# Altium footprint library SOMs.PcbLib: 40 footprints (part 1 of 3)
Each footprint in its own frame and in the unit in brackets; x right, y up, seen from the top. Pads: shape width x height; smd on the part's side, far side on the other; paste and mask are expansions set on the pad; w line width, h text height; cw(c..) or ccw(c..) is an arc to the next point about the centre after c.
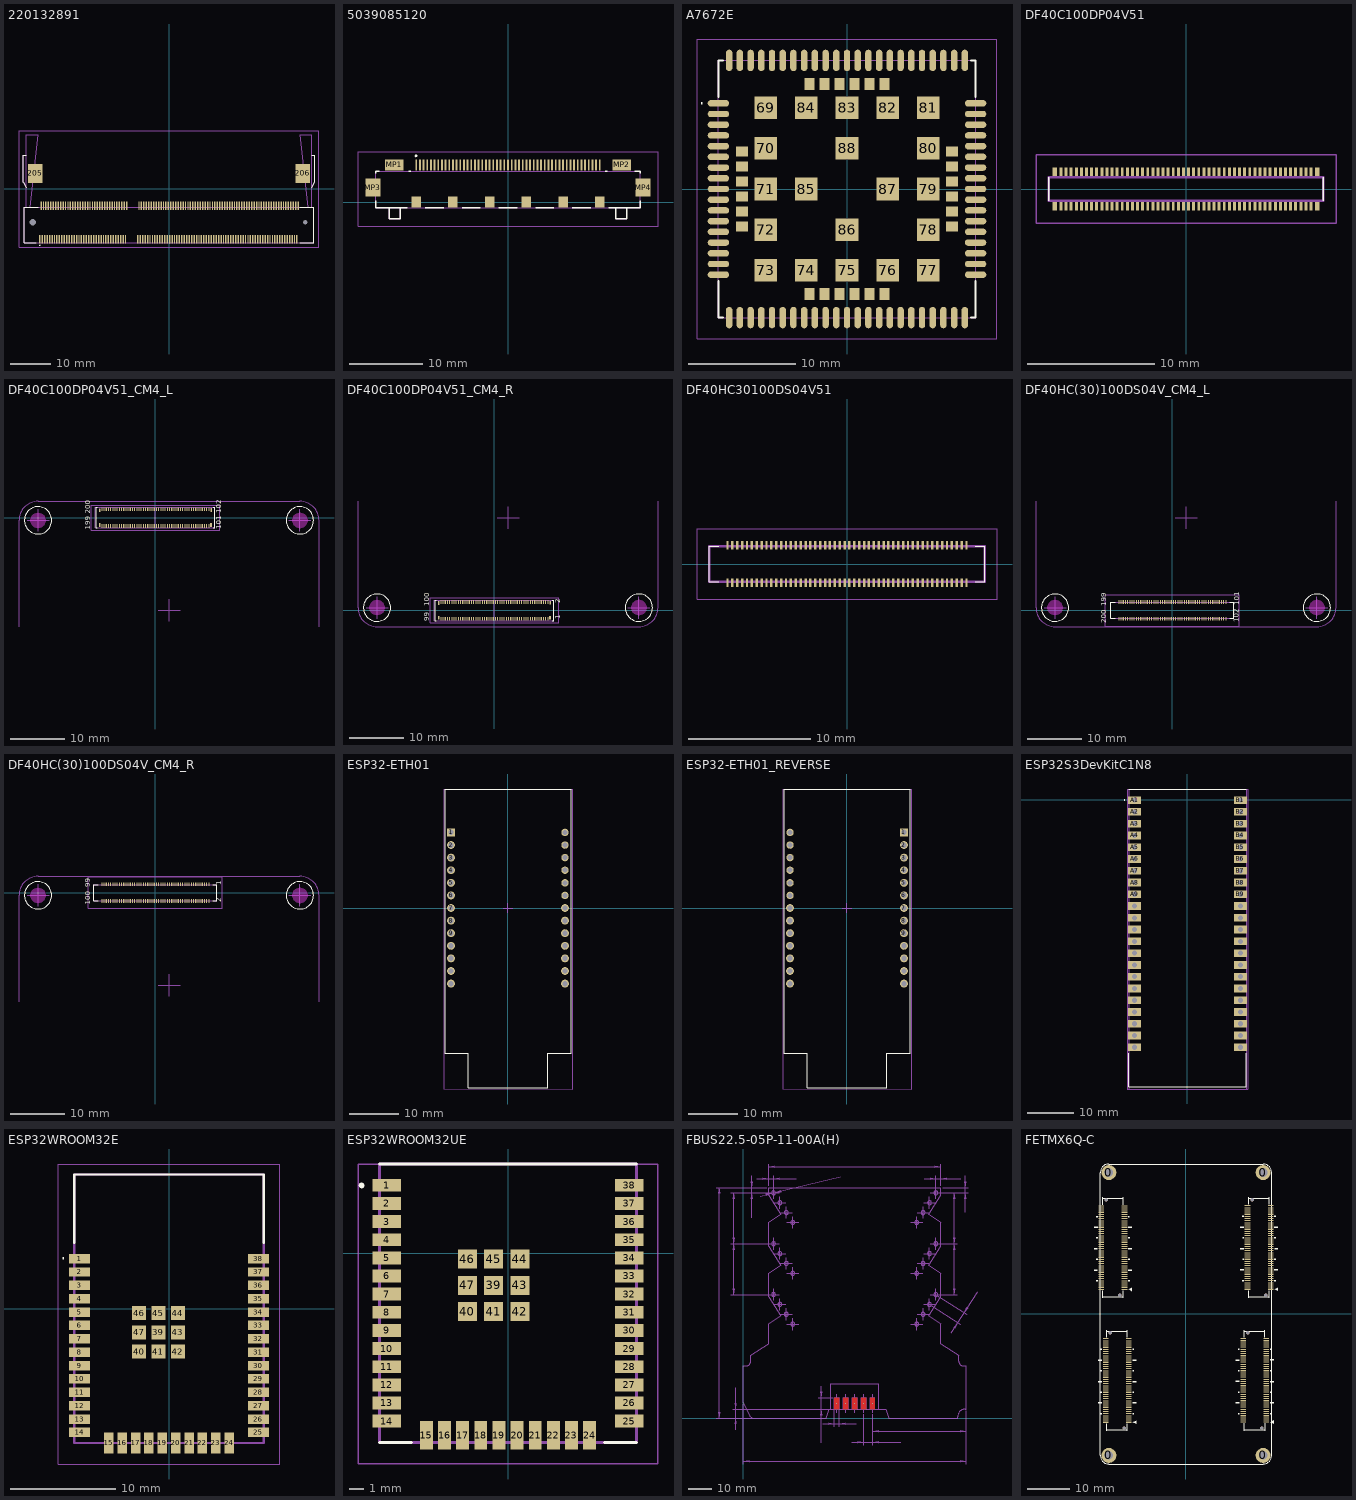
[diagram p0: the footprints below, top view; thin cyan lines are the x and y axes]

## 220132891 [mm]
pads (208):
  rect 0.35x2 smd: 1(-31.65,-12.35) 2(-31.35,-4.15) 3(-31.05,-12.35) 4(-30.75,-4.15) 5(-30.45,-12.35) 6(-30.15,-4.15) 7(-29.85,-12.35) 8(-29.55,-4.15) 9(-29.25,-12.35) 10(-28.95,-4.15) 11(-28.65,-12.35) 12(-28.35,-4.15) 13(-28.05,-12.35) 14(-27.75,-4.15) 15(-27.45,-12.35) 16(-27.15,-4.15) 17(-26.85,-12.35) 18(-26.55,-4.15) 19(-26.25,-12.35) 20(-25.95,-4.15) 21(-25.65,-12.35) 22(-25.35,-4.15) 23(-25.05,-12.35) 24(-24.75,-4.15) 25(-24.45,-12.35) 26(-24.15,-4.15) 27(-23.85,-12.35) 28(-23.55,-4.15) 29(-23.25,-12.35) 30(-22.95,-4.15) 31(-22.65,-12.35) 32(-22.35,-4.15) 33(-22.05,-12.35) 34(-21.75,-4.15) 35(-21.45,-12.35) 36(-21.15,-4.15) 37(-20.85,-12.35) 38(-20.55,-4.15) 39(-20.25,-12.35) 40(-19.95,-4.15) 41(-19.65,-12.35) 42(-19.35,-4.15) 43(-19.05,-12.35) 44(-18.75,-4.15) 45(-18.45,-12.35) 46(-18.15,-4.15) 47(-17.85,-12.35) 48(-17.55,-4.15) 49(-17.25,-12.35) 50(-16.95,-4.15) 51(-16.65,-12.35) 52(-16.35,-4.15) 53(-16.05,-12.35) 54(-15.75,-4.15) 55(-15.45,-12.35) 56(-15.15,-4.15) 57(-14.85,-12.35) 58(-14.55,-4.15) 59(-14.25,-12.35) 60(-13.95,-4.15) 61(-13.65,-12.35) 62(-13.35,-4.15) 63(-13.05,-12.35) 64(-12.75,-4.15) 65(-12.45,-12.35) 66(-12.15,-4.15) 67(-11.85,-12.35) 68(-11.55,-4.15) 69(-11.25,-12.35) 70(-10.95,-4.15) 71(-10.65,-12.35) 72(-10.35,-4.15) 73(-7.65,-12.35) 74(-7.35,-4.15) 75(-7.05,-12.35) 76(-6.75,-4.15) 77(-6.45,-12.35) 78(-6.15,-4.15) 79(-5.85,-12.35) 80(-5.55,-4.15) 81(-5.25,-12.35) 82(-4.95,-4.15) 83(-4.65,-12.35) 84(-4.35,-4.15) 85(-4.05,-12.35) 86(-3.75,-4.15) 87(-3.45,-12.35) 88(-3.15,-4.15) 89(-2.85,-12.35) 90(-2.55,-4.15) 91(-2.25,-12.35) 92(-1.95,-4.15) 93(-1.65,-12.35) 94(-1.35,-4.15) 95(-1.05,-12.35) 96(-0.75,-4.15) 97(-0.45,-12.35) 98(-0.15,-4.15) 99(0.15,-12.35) 100(0.45,-4.15) 101(0.75,-12.35) 102(1.05,-4.15) 103(1.35,-12.35) 104(1.65,-4.15) 105(1.95,-12.35) 106(2.25,-4.15) 107(2.55,-12.35) 108(2.85,-4.15) 109(3.15,-12.35) 110(3.45,-4.15) 111(3.75,-12.35) 112(4.05,-4.15) 113(4.35,-12.35) 114(4.65,-4.15) 115(4.95,-12.35) 116(5.25,-4.15) 117(5.55,-12.35) 118(5.85,-4.15) 119(6.15,-12.35) 120(6.45,-4.15) 121(6.75,-12.35) 122(7.05,-4.15) 123(7.35,-12.35) 124(7.65,-4.15) 125(7.95,-12.35) 126(8.25,-4.15) 127(8.55,-12.35) 128(8.85,-4.15) 129(9.15,-12.35) 130(9.45,-4.15) 131(9.75,-12.35) 132(10.05,-4.15) 133(10.35,-12.35) 134(10.65,-4.15) 135(10.95,-12.35) 136(11.25,-4.15) 137(11.55,-12.35) 138(11.85,-4.15) 139(12.15,-12.35) 140(12.45,-4.15) 141(12.75,-12.35) 142(13.05,-4.15) 143(13.35,-12.35) 144(13.65,-4.15) 145(13.95,-12.35) 146(14.25,-4.15) 147(14.55,-12.35) 148(14.85,-4.15) 149(15.15,-12.35) 150(15.45,-4.15) 151(15.75,-12.35) 152(16.05,-4.15) 153(16.35,-12.35) 154(16.65,-4.15) 155(16.95,-12.35) 156(17.25,-4.15) 157(17.55,-12.35) 158(17.85,-4.15) 159(18.15,-12.35) 160(18.45,-4.15) 161(18.75,-12.35) 162(19.05,-4.15) 163(19.35,-12.35) 164(19.65,-4.15) 165(19.95,-12.35) 166(20.25,-4.15) 167(20.55,-12.35) 168(20.85,-4.15) 169(21.15,-12.35) 170(21.45,-4.15) 171(21.75,-12.35) 172(22.05,-4.15) 173(22.35,-12.35) 174(22.65,-4.15) 175(22.95,-12.35) 176(23.25,-4.15) 177(23.55,-12.35) 178(23.85,-4.15) 179(24.15,-12.35) 180(24.45,-4.15) 181(24.75,-12.35) 182(25.05,-4.15) 183(25.35,-12.35) 184(25.65,-4.15) 185(25.95,-12.35) 186(26.25,-4.15) 187(26.55,-12.35) 188(26.85,-4.15) 189(27.15,-12.35) 190(27.45,-4.15) 191(27.75,-12.35) 192(28.05,-4.15) 193(28.35,-12.35) 194(28.65,-4.15) 195(28.95,-12.35) 196(29.25,-4.15) 197(29.55,-12.35) 198(29.85,-4.15) 199(30.15,-12.35) 200(30.45,-4.15) 201(30.75,-12.35) 202(31.05,-4.15) 203(31.35,-12.35) 204(31.65,-4.15)
  rect 3.5x4.6 smd: 205(-32.8,3.75) 206(32.8,3.75)
  round 0.8 hole 1.6 unplated: 207(-33.4,-8.25)
  round 0.55 hole 1.1 unplated: 208(33.4,-8.25)
Top Overlay:
  lines w0.1: -31.65,-13.9 ccw(c-31.65,-13.85) -31.65,-13.8 ccw(c-31.65,-13.85) -31.65,-13.9
  lines w0.2: -35,0.25 -35.75,1.6 -35.75,8.2 -35,8.2 ; -32.5,-13.25 -35.5,-13.25 -35.5,-4.55 -32,-4.55 ; 32,-13.25 35.5,-13.25 35.5,-4.55 32,-4.55 ; 35,0.2 35.75,1.6 35.75,8.2 35,8.2
Mechanical 13:
  lines w0.1: -35,-4.55 -35,13.25 -32,13.25 -34,-4.55 ; -35,0.2 -35.75,1.6 -35.75,8.2 -35,8.2 ; 34,-4.55 32,13.25 35,13.25 35,-4.55 ; 35,0.2 35.75,1.6 35.75,8.2 35,8.2 ; -35.5,-13.25 -35.5,-4.55 35.5,-4.55 35.5,-13.25 -35.5,-13.25
Mechanical 15:
  lines w0.1: -36.75,-14.35 -36.75,14.25 36.75,14.25 36.75,-14.35 -36.75,-14.35
3D body "2-2013289-1.stp": height 5.51, standoff -0.64, extent -35.8,-13.3 35.8,13.24

## 5039085120 [mm]
pads (61):
  rect 0.25x1.55 smd: 1(-12.5,5.05) 2(-12,5.05) 3(-11.5,5.05) 4(-11,5.05) 5(-10.5,5.05) 6(-10,5.05) 7(-9.5,5.05) 8(-9,5.05) 9(-8.5,5.05) 10(-8,5.05) 11(-7.5,5.05) 12(-7,5.05) 13(-6.5,5.05) 14(-6,5.05) 15(-5.5,5.05) 16(-5,5.05) 17(-4.5,5.05) 18(-4,5.05) 19(-3.5,5.05) 20(-3,5.05) 21(-2.5,5.05) 22(-2,5.05) 23(-1.5,5.05) 24(-1,5.05) 25(-0.5,5.05) 26(0,5.05) 27(0.5,5.05) 28(1,5.05) 29(1.5,5.05) 30(2,5.05) 31(2.5,5.05) 32(3,5.05) 33(3.5,5.05) 34(4,5.05) 35(4.5,5.05) 36(5,5.05) 37(5.5,5.05) 38(6,5.05) 39(6.5,5.05) 40(7,5.05) 41(7.5,5.05) 42(8,5.05) 43(8.5,5.05) 44(9,5.05) 45(9.5,5.05) 46(10,5.05) 47(10.5,5.05) 48(11,5.05) 49(11.5,5.05) 50(12,5.05) 51(12.5,5.05)
  rect 2.5x1.55 smd: MP1(-15.5,5.05) MP2(15.5,5.05)
  rect 2.05x2.5 smd: MP3(-18.4,1.975) MP4(18.4,1.975)
  rect 1.3x1.55 smd: MP5(-12.5,0) MP6(-7.5,0) MP7(-2.5,0) MP8(2.5,0) MP9(7.5,0) MP10(12.5,0)
Top Overlay:
  lines w0.2: -18,-0.77 -16.15,-0.77 ; -18,-0.77 -16.15,-0.77 ; -18,-0.77 -18,0.205 -18,-0.77 ; -18,4.18 -17.5,4.18 -17.5,4.205 -18,4.205 -18,4.18 ; -18,4.18 -18,3.955 -18,4.18 ; -16.15,-0.77 -14.65,-0.77 ; -16.15,-0.77 -16.15,-2.27 -14.65,-2.27 -14.65,-0.77 ; -14.65,-0.77 -13.75,-0.77 -13.75,-0.795 -14.65,-0.795 -14.65,-0.77 ; -12.5,6.2 cw(c-12.5,6.3) -12.5,6.4 ; -12.5,6.2 ccw(c-12.5,6.3) -12.5,6.4 ; -12.5,6.2 cw(c-12.5,6.3) -12.5,6.4 ; 14.65,-0.77 13.75,-0.77 14.65,-0.77 ; 14.65,-0.77 16.15,-0.77 ; 14.65,-0.77 14.65,-2.27 16.15,-2.27 16.15,-0.77 ; 16.15,-0.77 18,-0.77 ; 16.15,-0.77 16.15,-0.795 18,-0.795 18,-0.77 ; 18,-0.77 18,0.205 18,-0.77 ; 18,4.18 17.25,4.18 18,4.18 ; 18,4.18 18,3.955 18,4.18 ; -13.5,4.18 -13.25,4.18 -13.5,4.18 ; -11.25,-0.77 -8.75,-0.77 -11.25,-0.77 ; -6.25,-0.77 -3.75,-0.77 -6.25,-0.77 ; -1.25,-0.77 1.25,-0.77 -1.25,-0.77 ; 3.75,-0.77 6.25,-0.77 3.75,-0.77 ; 8.75,-0.77 11.25,-0.77 8.75,-0.77 ; 13.25,4.18 13.5,4.18 13.5,4.205 13.25,4.205 13.25,4.18
Mechanical 13:
  lines w0.1: -18,-0.77 18,-0.77 18,4.18 -18,4.18 -18,-0.77 ; -16.15,-2.27 -14.65,-2.27 -14.65,-0.77 -16.15,-0.77 -16.15,-2.27 ; 14.65,-2.27 16.15,-2.27 16.15,-0.77 14.65,-0.77 14.65,-2.27
Mechanical 15:
  lines w0.1: -20.425,-3.27 20.425,-3.27 20.425,6.825 -20.425,6.825 -20.425,-3.27
3D body "503908-5120.stp": height 3.75, standoff 0, extent -18.925,-1.9 18.925,5.45

## A7672E [mm]
pads (124):
  rrect100% 2x0.6 smd: 1(-12,8) 2(-12,7) 3(-12,6) 4(-12,5) 5(-12,4) 6(-12,3) 7(-12,2) 8(-12,1) 9(-12,0) 10(-12,-1) 11(-12,-2) 12(-12,-3) 13(-12,-4) 14(-12,-5) 15(-12,-6) 16(-12,-7) 17(-12,-8) 35(12,-8) 36(12,-7) 37(12,-6) 38(12,-5) 39(12,-4) 40(12,-3) 41(12,-2) 42(12,-1) 43(12,0) 44(12,1) 45(12,2) 46(12,3) 47(12,4) 48(12,5) 49(12,6) 50(12,7) 51(12,8)
  rrect100% 0.6x2 smd: 18(-8,-12) 19(-7,-12) 20(-6,-12) 21(-5,-12) 22(-4,-12) 23(-3,-12) 24(-2,-12) 25(-1,-12) 26(0,-12) 27(1,-12) 28(2,-12) 29(3,-12) 30(4,-12) 31(5,-12) 32(6,-12) 33(7,-12) 34(8,-12) 52(8,12) 53(7,12) 54(6,12) 55(5,12) 56(4,12) 57(3,12) 58(2,12) 59(1,12) 60(0,12) 61(-1,12) 62(-2,12) 63(-3,12) 64(-4,12) 65(-5,12) 66(-6,12) 67(-7,12) 68(-8,12) 89(-11,-12) 90(-10,-12) 91(-9,-12) 92(9,-12) 93(10,-12) 94(11,-12) 95(11,12) 96(10,12) 97(9,12) 98(-9,12) 99(-10,12) 100(-11,12)
  rect 2.1x2.1 smd: 69(-7.6,7.6) 70(-7.6,3.8) 71(-7.6,0) 72(-7.6,-3.8) 73(-7.6,-7.6) 74(-3.8,-7.6) 75(0,-7.6) 76(3.8,-7.6) 77(7.6,-7.6) 78(7.6,-3.8) 79(7.6,0) 80(7.6,3.8) 81(7.6,7.6) 82(3.8,7.6) 83(0,7.6) 84(-3.8,7.6) 85(-3.8,0) 86(0,-3.8) 87(3.8,0) 88(0,3.8)
  rect 1.1x0.9 smd: 101(-9.8,3.5) 102(-9.8,2.1) 103(-9.8,0.7) 104(-9.8,-0.7) 105(-9.8,-2.1) 106(-9.8,-3.5) 113(9.8,-3.5) 114(9.8,-2.1) 115(9.8,-0.7) 116(9.8,0.7) 117(9.8,2.1) 118(9.8,3.5)
  rect 0.9x1.1 smd: 107(-3.5,-9.8) 108(-2.1,-9.8) 109(-0.7,-9.8) 110(0.7,-9.8) 111(2.1,-9.8) 112(3.5,-9.8) 119(3.5,9.8) 120(2.1,9.8) 121(0.7,9.8) 122(-0.7,9.8) 123(-2.1,9.8) 124(-3.5,9.8)
Top Overlay:
  lines w0.1: -13.6,8 ccw(c-13.55,8) -13.5,8 ccw(c-13.55,8) -13.6,8
  lines w0.2: -12,-8.6 -12,-12 -11.6,-12 ; -12,8.6 -12,12 -11.6,12 ; 11.6,-12 12,-12 12,-8.6 ; 11.6,12 12,12 12,8.6
Mechanical 13:
  lines w0.1: -12,-12 12,-12 12,12 -12,12 -12,-12
Mechanical 15:
  lines w0.1: -14,-14 14,-14 14,14 -14,14 -14,-14
3D body "A7672E.stp": height 2.7, standoff 0, extent -12,-12 12,12

## DF40C100DP04V51 [mm]
pads (104):
  rect 0.23x0.66 smd: 1(-9.8,-1.355) 2(-9.8,1.355) 3(-9.4,-1.355) 4(-9.4,1.355) 5(-9,-1.355) 6(-9,1.355) 7(-8.6,-1.355) 8(-8.6,1.355) 9(-8.2,-1.355) 10(-8.2,1.355) 11(-7.8,-1.355) 12(-7.8,1.355) 13(-7.4,-1.355) 14(-7.4,1.355) 15(-7,-1.355) 16(-7,1.355) 17(-6.6,-1.355) 18(-6.6,1.355) 19(-6.2,-1.355) 20(-6.2,1.355) 21(-5.8,-1.355) 22(-5.8,1.355) 23(-5.4,-1.355) 24(-5.4,1.355) 25(-5,-1.355) 26(-5,1.355) 27(-4.6,-1.355) 28(-4.6,1.355) 29(-4.2,-1.355) 30(-4.2,1.355) 31(-3.8,-1.355) 32(-3.8,1.355) 33(-3.4,-1.355) 34(-3.4,1.355) 35(-3,-1.355) 36(-3,1.355) 37(-2.6,-1.355) 38(-2.6,1.355) 39(-2.2,-1.355) 40(-2.2,1.355) 41(-1.8,-1.355) 42(-1.8,1.355) 43(-1.4,-1.355) 44(-1.4,1.355) 45(-1,-1.355) 46(-1,1.355) 47(-0.6,-1.355) 48(-0.6,1.355) 49(-0.2,-1.355) 50(-0.2,1.355) 51(0.2,-1.355) 52(0.2,1.355) 53(0.6,-1.355) 54(0.6,1.355) 55(1,-1.355) 56(1,1.355) 57(1.4,-1.355) 58(1.4,1.355) 59(1.8,-1.355) 60(1.8,1.355) 61(2.2,-1.355) 62(2.2,1.355) 63(2.6,-1.355) 64(2.6,1.355) 65(3,-1.355) 66(3,1.355) 67(3.4,-1.355) 68(3.4,1.355) 69(3.8,-1.355) 70(3.8,1.355) 71(4.2,-1.355) 72(4.2,1.355) 73(4.6,-1.355) 74(4.6,1.355) 75(5,-1.355) 76(5,1.355) 77(5.4,-1.355) 78(5.4,1.355) 79(5.8,-1.355) 80(5.8,1.355) 81(6.2,-1.355) 82(6.2,1.355) 83(6.6,-1.355) 84(6.6,1.355) 85(7,-1.355) 86(7,1.355) 87(7.4,-1.355) 88(7.4,1.355) 89(7.8,-1.355) 90(7.8,1.355) 91(8.2,-1.355) 92(8.2,1.355) 93(8.6,-1.355) 94(8.6,1.355) 95(9,-1.355) 96(9,1.355) 97(9.4,-1.355) 98(9.4,1.355) 99(9.8,-1.355) 100(9.8,1.355)
  rect 0.35x0.66 smd: 101(-10.275,1.355) 102(-10.275,-1.355) 103(10.275,-1.355) 104(10.275,1.355)
Top Overlay:
  lines w0.1: -10.76,-0.925 -10.76,0.925 ; 10.76,-0.925 10.76,0.925
Top 3D Body:
  lines w0.2: -10.76,-0.925 10.76,-0.925 10.76,0.925 -10.76,0.925 -10.76,-0.925
Top Courtyard:
  lines w0.1: -11.76,-2.685 11.76,-2.685 11.76,2.685 -11.76,2.685 -11.76,-2.685
3D body "DF40C-100DP-0.4V_51_.stp": height 1.14, standoff 0, extent -10.76,-1.49 10.76,1.48

## DF40C100DP04V51_CM4_L [mm]
pads (104):
  rect 0.2x0.7 smd: 1(9.8,-1.54) 2(9.8,1.54) 3(9.4,-1.54) 4(9.4,1.54) 5(9,-1.54) 6(9,1.54) 7(8.6,-1.54) 8(8.6,1.54) 9(8.2,-1.54) 10(8.2,1.54) 11(7.8,-1.54) 12(7.8,1.54) 13(7.4,-1.54) 14(7.4,1.54) 15(7,-1.54) 16(7,1.54) 17(6.6,-1.54) 18(6.6,1.54) 19(6.2,-1.54) 20(6.2,1.54) 21(5.8,-1.54) 22(5.8,1.54) 23(5.4,-1.54) 24(5.4,1.54) 25(5,-1.54) 26(5,1.54) 27(4.6,-1.54) 28(4.6,1.54) 29(4.2,-1.54) 30(4.2,1.54) 31(3.8,-1.54) 32(3.8,1.54) 33(3.4,-1.54) 34(3.4,1.54) 35(3,-1.54) 36(3,1.54) 37(2.6,-1.54) 38(2.6,1.54) 39(2.2,-1.54) 40(2.2,1.54) 41(1.8,-1.54) 42(1.8,1.54) 43(1.4,-1.54) 44(1.4,1.54) 45(1,-1.54) 46(1,1.54) 47(0.6,-1.54) 48(0.6,1.54) 49(0.2,-1.54) 50(0.2,1.54) 51(-0.2,-1.54) 52(-0.2,1.54) 53(-0.6,-1.54) 54(-0.6,1.54) 55(-1,-1.54) 56(-1,1.54) 57(-1.4,-1.54) 58(-1.4,1.54) 59(-1.8,-1.54) 60(-1.8,1.54) 61(-2.2,-1.54) 62(-2.2,1.54) 63(-2.6,-1.54) 64(-2.6,1.54) 65(-3,-1.54) 66(-3,1.54) 67(-3.4,-1.54) 68(-3.4,1.54) 69(-3.8,-1.54) 70(-3.8,1.54) 71(-4.2,-1.54) 72(-4.2,1.54) 73(-4.6,-1.54) 74(-4.6,1.54) 75(-5,-1.54) 76(-5,1.54) 77(-5.4,-1.54) 78(-5.4,1.54) 79(-5.8,-1.54) 80(-5.8,1.54) 81(-6.2,-1.54) 82(-6.2,1.54) 83(-6.6,-1.54) 84(-6.6,1.54) 85(-7,-1.54) 86(-7,1.54) 87(-7.4,-1.54) 88(-7.4,1.54) 89(-7.8,-1.54) 90(-7.8,1.54) 91(-8.2,-1.54) 92(-8.2,1.54) 93(-8.6,-1.54) 94(-8.6,1.54) 95(-9,-1.54) 96(-9,1.54) 97(-9.4,-1.54) 98(-9.4,1.54) 99(-9.8,-1.54) 100(-9.8,1.54)
  rect 0.35x0.66 smd: 101(10.2,-1.355) 102(10.25,1.405) 103(-10.2,1.355) 104(-10.2,-1.355)
Top Overlay:
  circle w0.1: c-21.5,-0.5 r2.5
  circle w0.1: c26.5,-0.5 r2.5
  lines w0.12: -10.629,-1.89 -10.85,-1.89 -10.85,1.89 -10.629,1.89 ; 10.628,1.89 10.85,1.89 10.85,-1.89 ; 10.85,-1.89 10.628,-1.89 10.85,-1.89
  text "101" at 12.461,-2.132 h1.6
  text "102" at 12.462,0.769 h1.6
  text "199" at -11.539,-2.229 h1.6
  text "200" at -11.538,0.674 h1.6
Keep-Out Layer:
  board cut-out: -20.1,-0.5 -20.1,-0.362 -20.154,-0.092 -20.259,0.163 -20.413,0.392 -20.608,0.587 -20.837,0.741 -21.092,0.846 -21.362,0.9 -21.5,0.9 -21.638,0.9 -21.908,0.846 -22.163,0.741 -22.392,0.587 -22.587,0.392 -22.741,0.163 -22.846,-0.092 -22.9,-0.362 -22.9,-0.5 -22.9,-0.638 -22.846,-0.908 -22.741,-1.163 -22.587,-1.392 -22.392,-1.587 -22.163,-1.741 -21.908,-1.846 -21.638,-1.9 -21.5,-1.9 -21.362,-1.9 -21.092,-1.846 -20.837,-1.741 -20.608,-1.587 -20.413,-1.392 -20.259,-1.163 -20.154,-0.908 -20.1,-0.638
  board cut-out: 27.9,-0.5 27.9,-0.362 27.846,-0.092 27.741,0.163 27.587,0.392 27.392,0.587 27.163,0.741 26.908,0.846 26.638,0.9 26.5,0.9 26.362,0.9 26.092,0.846 25.837,0.741 25.608,0.587 25.413,0.392 25.259,0.163 25.154,-0.092 25.1,-0.362 25.1,-0.5 25.1,-0.638 25.154,-0.908 25.259,-1.163 25.413,-1.392 25.608,-1.587 25.837,-1.741 26.092,-1.846 26.362,-1.9 26.5,-1.9 26.638,-1.9 26.908,-1.846 27.163,-1.741 27.392,-1.587 27.587,-1.392 27.741,-1.163 27.846,-0.908 27.9,-0.638
Top Assembly:
  lines w0.12: 0,-1.91 0,1.87 ; 0,-1.9 0,1.88 ; -11,-1.89 10.85,-1.89 10.85,1.89 -11,1.89 -11,-1.89
  lines w0.15: -25,-0.5 cw(c-21.5,-0.5) -21.5,3 ; -23.5,-0.5 -19.5,-0.5 ; -21.5,-2.5 -21.5,1.5 ; 0.55,-17 4.55,-17 ; 2.55,-19 2.55,-15 ; 24.5,-0.5 28.5,-0.5 ; 26.5,-2.5 26.5,1.5 ; 26.5,3 cw(c26.5,-0.5) 30,-0.5
  lines w0.18: -25,-20 -25,-0.5 ; -21.5,3 26.5,3 ; 30,-20 30,-0.5
  text "CM4_center" at -2.283,-14.376 h3
Top Courtyard:
  lines w0.1: -11.76,-2.275 11.76,-2.275 11.76,2.275 -11.76,2.275 -11.76,-2.275
3D body "DF40C-100DP-0.4V_51_.stp": height 1.14, standoff 0, extent -10.76,-1.495 10.76,1.475

## DF40C100DP04V51_CM4_R [mm]
pads (104):
  rect 0.2x0.7 smd: 1(9.8,-1.54) 2(9.8,1.54) 3(9.4,-1.54) 4(9.4,1.54) 5(9,-1.54) 6(9,1.54) 7(8.6,-1.54) 8(8.6,1.54) 9(8.2,-1.54) 10(8.2,1.54) 11(7.8,-1.54) 12(7.8,1.54) 13(7.4,-1.54) 14(7.4,1.54) 15(7,-1.54) 16(7,1.54) 17(6.6,-1.54) 18(6.6,1.54) 19(6.2,-1.54) 20(6.2,1.54) 21(5.8,-1.54) 22(5.8,1.54) 23(5.4,-1.54) 24(5.4,1.54) 25(5,-1.54) 26(5,1.54) 27(4.6,-1.54) 28(4.6,1.54) 29(4.2,-1.54) 30(4.2,1.54) 31(3.8,-1.54) 32(3.8,1.54) 33(3.4,-1.54) 34(3.4,1.54) 35(3,-1.54) 36(3,1.54) 37(2.6,-1.54) 38(2.6,1.54) 39(2.2,-1.54) 40(2.2,1.54) 41(1.8,-1.54) 42(1.8,1.54) 43(1.4,-1.54) 44(1.4,1.54) 45(1,-1.54) 46(1,1.54) 47(0.6,-1.54) 48(0.6,1.54) 49(0.2,-1.54) 50(0.2,1.54) 51(-0.2,-1.54) 52(-0.2,1.54) 53(-0.6,-1.54) 54(-0.6,1.54) 55(-1,-1.54) 56(-1,1.54) 57(-1.4,-1.54) 58(-1.4,1.54) 59(-1.8,-1.54) 60(-1.8,1.54) 61(-2.2,-1.54) 62(-2.2,1.54) 63(-2.6,-1.54) 64(-2.6,1.54) 65(-3,-1.54) 66(-3,1.54) 67(-3.4,-1.54) 68(-3.4,1.54) 69(-3.8,-1.54) 70(-3.8,1.54) 71(-4.2,-1.54) 72(-4.2,1.54) 73(-4.6,-1.54) 74(-4.6,1.54) 75(-5,-1.54) 76(-5,1.54) 77(-5.4,-1.54) 78(-5.4,1.54) 79(-5.8,-1.54) 80(-5.8,1.54) 81(-6.2,-1.54) 82(-6.2,1.54) 83(-6.6,-1.54) 84(-6.6,1.54) 85(-7,-1.54) 86(-7,1.54) 87(-7.4,-1.54) 88(-7.4,1.54) 89(-7.8,-1.54) 90(-7.8,1.54) 91(-8.2,-1.54) 92(-8.2,1.54) 93(-8.6,-1.54) 94(-8.6,1.54) 95(-9,-1.54) 96(-9,1.54) 97(-9.4,-1.54) 98(-9.4,1.54) 99(-9.8,-1.54) 100(-9.8,1.54)
  rect 0.35x0.66 smd: 101(10.2,-1.355) 102(10.25,1.405) 103(-10.2,1.355) 104(-10.2,-1.355)
Top Overlay:
  circle w0.1: c-21.5,0.5 r2.5
  circle w0.1: c26.5,0.5 r2.5
  lines w0.12: -10.629,-1.89 -10.85,-1.89 -10.85,1.89 -10.629,1.89 ; 10.628,1.89 10.85,1.89 10.85,-1.89 ; 10.85,-1.89 10.628,-1.89 10.85,-1.89
  text "1" at 12.461,-1.641 h1.6
  text "2" at 12.462,1.261 h1.6
  text "99" at -11.539,-2.033 h1.6
  text "100" at -11.539,0.771 h1.6
Keep-Out Layer:
  board cut-out: -20.1,0.5 -20.1,0.362 -20.154,0.092 -20.259,-0.163 -20.413,-0.392 -20.608,-0.587 -20.837,-0.741 -21.092,-0.846 -21.362,-0.9 -21.5,-0.9 -21.638,-0.9 -21.908,-0.846 -22.163,-0.741 -22.392,-0.587 -22.587,-0.392 -22.741,-0.163 -22.846,0.092 -22.9,0.362 -22.9,0.5 -22.9,0.638 -22.846,0.908 -22.741,1.163 -22.587,1.392 -22.392,1.587 -22.163,1.741 -21.908,1.846 -21.638,1.9 -21.5,1.9 -21.362,1.9 -21.092,1.846 -20.837,1.741 -20.608,1.587 -20.413,1.392 -20.259,1.163 -20.154,0.908 -20.1,0.638
  board cut-out: 27.9,0.5 27.9,0.362 27.846,0.092 27.741,-0.163 27.587,-0.392 27.392,-0.587 27.163,-0.741 26.908,-0.846 26.638,-0.9 26.5,-0.9 26.362,-0.9 26.092,-0.846 25.837,-0.741 25.608,-0.587 25.413,-0.392 25.259,-0.163 25.154,0.092 25.1,0.362 25.1,0.5 25.1,0.638 25.154,0.908 25.259,1.163 25.413,1.392 25.608,1.587 25.837,1.741 26.092,1.846 26.362,1.9 26.5,1.9 26.638,1.9 26.908,1.846 27.163,1.741 27.392,1.587 27.587,1.392 27.741,1.163 27.846,0.908 27.9,0.638
Top Assembly:
  lines w0.12: 0,-1.91 0,1.87 ; 0,-1.9 0,1.88 ; -11,-1.89 -11,1.89 10.85,1.89 10.85,-1.89 -11,-1.89
  lines w0.15: -25,0.5 ccw(c-21.5,0.5) -21.5,-3 ; -23.5,0.5 -19.5,0.5 ; -21.5,-1.5 -21.5,2.5 ; 0.55,17 4.55,17 ; 2.55,15 2.55,19 ; 24.5,0.5 28.5,0.5 ; 26.5,-3 ccw(c26.5,0.5) 30,0.5 ; 26.5,-1.5 26.5,2.5
  lines w0.18: -25,0.5 -25,20 ; -21.5,-3 26.5,-3 ; 30,0.5 30,20
  text "CM4_center" at -2.358,12.774 h3
Top Courtyard:
  lines w0.1: -11.76,-2.275 -11.76,2.275 11.76,2.275 11.76,-2.275 -11.76,-2.275
3D body "DF40C-100DP-0.4V_51_.stp": height 1.14, standoff 0, extent -10.76,-1.495 10.76,1.475

## DF40HC30100DS04V51 [mm]
height 2.4
pads (100):
  rect 0.2x0.7 smd: 1(-9.8,-1.54) 2(-9.8,1.54) 3(-9.4,-1.54) 4(-9.4,1.54) 5(-9,-1.54) 6(-9,1.54) 7(-8.6,-1.54) 8(-8.6,1.54) 9(-8.2,-1.54) 10(-8.2,1.54) 11(-7.8,-1.54) 12(-7.8,1.54) 13(-7.4,-1.54) 14(-7.4,1.54) 15(-7,-1.54) 16(-7,1.54) 17(-6.6,-1.54) 18(-6.6,1.54) 19(-6.2,-1.54) 20(-6.2,1.54) 21(-5.8,-1.54) 22(-5.8,1.54) 23(-5.4,-1.54) 24(-5.4,1.54) 25(-5,-1.54) 26(-5,1.54) 27(-4.6,-1.54) 28(-4.6,1.54) 29(-4.2,-1.54) 30(-4.2,1.54) 31(-3.8,-1.54) 32(-3.8,1.54) 33(-3.4,-1.54) 34(-3.4,1.54) 35(-3,-1.54) 36(-3,1.54) 37(-2.6,-1.54) 38(-2.6,1.54) 39(-2.2,-1.54) 40(-2.2,1.54) 41(-1.8,-1.54) 42(-1.8,1.54) 43(-1.4,-1.54) 44(-1.4,1.54) 45(-1,-1.54) 46(-1,1.54) 47(-0.6,-1.54) 48(-0.6,1.54) 49(-0.2,-1.54) 50(-0.2,1.54) 51(0.2,-1.54) 52(0.2,1.54) 53(0.6,-1.54) 54(0.6,1.54) 55(1,-1.54) 56(1,1.54) 57(1.4,-1.54) 58(1.4,1.54) 59(1.8,-1.54) 60(1.8,1.54) 61(2.2,-1.54) 62(2.2,1.54) 63(2.6,-1.54) 64(2.6,1.54) 65(3,-1.54) 66(3,1.54) 67(3.4,-1.54) 68(3.4,1.54) 69(3.8,-1.54) 70(3.8,1.54) 71(4.2,-1.54) 72(4.2,1.54) 73(4.6,-1.54) 74(4.6,1.54) 75(5,-1.54) 76(5,1.54) 77(5.4,-1.54) 78(5.4,1.54) 79(5.8,-1.54) 80(5.8,1.54) 81(6.2,-1.54) 82(6.2,1.54) 83(6.6,-1.54) 84(6.6,1.54) 85(7,-1.54) 86(7,1.54) 87(7.4,-1.54) 88(7.4,1.54) 89(7.8,-1.54) 90(7.8,1.54) 91(8.2,-1.54) 92(8.2,1.54) 93(8.6,-1.54) 94(8.6,1.54) 95(9,-1.54) 96(9,1.54) 97(9.4,-1.54) 98(9.4,1.54) 99(9.8,-1.54) 100(9.8,1.54)
Top Overlay:
  lines w0.1: -10.5,-1.47 -11.3,-1.47 -11.3,1.47 -10.5,1.47 ; 10.5,-1.47 11.3,-1.47 11.3,1.47 10.5,1.47
Top 3D Body:
  lines w0.2: -11.3,-1.47 11.3,-1.47 11.3,1.47 -11.3,1.47 -11.3,-1.47
Top Courtyard:
  lines w0.1: -12.3,-2.89 12.3,-2.89 12.3,2.89 -12.3,2.89 -12.3,-2.89
3D body "DF40HC_3.0_-100DS-0.4V_51.stp": height 2.91, standoff 0.01, extent -11.3,-1.69 11.3,1.69

## DF40HC(30)100DS04V_CM4_L [mm]
height 2.4
pads (100):
  rect 0.2x0.7 smd: 1(9.8,1.54) 2(9.8,-1.54) 3(9.4,1.54) 4(9.4,-1.54) 5(9,1.54) 6(9,-1.54) 7(8.6,1.54) 8(8.6,-1.54) 9(8.2,1.54) 10(8.2,-1.54) 11(7.8,1.54) 12(7.8,-1.54) 13(7.4,1.54) 14(7.4,-1.54) 15(7,1.54) 16(7,-1.54) 17(6.6,1.54) 18(6.6,-1.54) 19(6.2,1.54) 20(6.2,-1.54) 21(5.8,1.54) 22(5.8,-1.54) 23(5.4,1.54) 24(5.4,-1.54) 25(5,1.54) 26(5,-1.54) 27(4.6,1.54) 28(4.6,-1.54) 29(4.2,1.54) 30(4.2,-1.54) 31(3.8,1.54) 32(3.8,-1.54) 33(3.4,1.54) 34(3.4,-1.54) 35(3,1.54) 36(3,-1.54) 37(2.6,1.54) 38(2.6,-1.54) 39(2.2,1.54) 40(2.2,-1.54) 41(1.8,1.54) 42(1.8,-1.54) 43(1.4,1.54) 44(1.4,-1.54) 45(1,1.54) 46(1,-1.54) 47(0.6,1.54) 48(0.6,-1.54) 49(0.2,1.54) 50(0.2,-1.54) 51(-0.2,1.54) 52(-0.2,-1.54) 53(-0.6,1.54) 54(-0.6,-1.54) 55(-1,1.54) 56(-1,-1.54) 57(-1.4,1.54) 58(-1.4,-1.54) 59(-1.8,1.54) 60(-1.8,-1.54) 61(-2.2,1.54) 62(-2.2,-1.54) 63(-2.6,1.54) 64(-2.6,-1.54) 65(-3,1.54) 66(-3,-1.54) 67(-3.4,1.54) 68(-3.4,-1.54) 69(-3.8,1.54) 70(-3.8,-1.54) 71(-4.2,1.54) 72(-4.2,-1.54) 73(-4.6,1.54) 74(-4.6,-1.54) 75(-5,1.54) 76(-5,-1.54) 77(-5.4,1.54) 78(-5.4,-1.54) 79(-5.8,1.54) 80(-5.8,-1.54) 81(-6.2,1.54) 82(-6.2,-1.54) 83(-6.6,1.54) 84(-6.6,-1.54) 85(-7,1.54) 86(-7,-1.54) 87(-7.4,1.54) 88(-7.4,-1.54) 89(-7.8,1.54) 90(-7.8,-1.54) 91(-8.2,1.54) 92(-8.2,-1.54) 93(-8.6,1.54) 94(-8.6,-1.54) 95(-9,1.54) 96(-9,-1.54) 97(-9.4,1.54) 98(-9.4,-1.54) 99(-9.8,1.54) 100(-9.8,-1.54)
Top Overlay:
  circle w0.1: c-21.5,0.5 r2.5
  circle w0.1: c26.5,0.5 r2.5
  lines w0.1: -10.5,-1.47 -11.3,-1.47 -11.3,1.47 -10.5,1.47 ; 10.5,-1.47 11.3,-1.47 11.3,1.47 10.5,1.47
  text "101" at 12.586,0.893 h1.6
  text "102" at 12.537,-2.206 h1.6
  text "200" at -11.738,-2.326 h1.6
  text "199" at -11.739,0.771 h1.6
Keep-Out Layer:
  board cut-out: -20.1,0.5 -20.1,0.362 -20.154,0.092 -20.259,-0.163 -20.413,-0.392 -20.608,-0.587 -20.837,-0.741 -21.092,-0.846 -21.362,-0.9 -21.5,-0.9 -21.638,-0.9 -21.908,-0.846 -22.163,-0.741 -22.392,-0.587 -22.587,-0.392 -22.741,-0.163 -22.846,0.092 -22.9,0.362 -22.9,0.5 -22.9,0.638 -22.846,0.908 -22.741,1.163 -22.587,1.392 -22.392,1.587 -22.163,1.741 -21.908,1.846 -21.638,1.9 -21.5,1.9 -21.362,1.9 -21.092,1.846 -20.837,1.741 -20.608,1.587 -20.413,1.392 -20.259,1.163 -20.154,0.908 -20.1,0.638
  board cut-out: 27.9,0.5 27.9,0.362 27.846,0.092 27.741,-0.163 27.587,-0.392 27.392,-0.587 27.163,-0.741 26.908,-0.846 26.638,-0.9 26.5,-0.9 26.362,-0.9 26.092,-0.846 25.837,-0.741 25.608,-0.587 25.413,-0.392 25.259,-0.163 25.154,0.092 25.1,0.362 25.1,0.5 25.1,0.638 25.154,0.908 25.259,1.163 25.413,1.392 25.608,1.587 25.837,1.741 26.092,1.846 26.362,1.9 26.5,1.9 26.638,1.9 26.908,1.846 27.163,1.741 27.392,1.587 27.587,1.392 27.741,1.163 27.846,0.908 27.9,0.638
Top Assembly:
  lines w0.15: -25,0.5 ccw(c-21.5,0.5) -21.5,-3 ; -23.5,0.5 -19.5,0.5 ; -21.5,-1.5 -21.5,2.5 ; 0.55,17 4.55,17 ; 2.55,15 2.55,19 ; 24.5,0.5 28.5,0.5 ; 26.5,-3 ccw(c26.5,0.5) 30,0.5 ; 26.5,-1.5 26.5,2.5
  lines w0.18: -25,0.5 -25,20 ; -21.5,-3 26.5,-3 ; 30,0.5 30,20
  text "CM4_center" at -2.283,12.874 h3
Top 3D Body:
  lines w0.2: -11.3,-1.47 -11.3,1.47 11.3,1.47 11.3,-1.47 -11.3,-1.47
Top Courtyard:
  lines w0.1: -12.3,-2.89 -12.3,2.89 12.3,2.89 12.3,-2.89 -12.3,-2.89
3D body "DF40HC_3.0_-100DS-0.4V_51.stp": height 2.91, standoff 0.01, extent -11.3,-1.69 11.3,1.69

## DF40HC(30)100DS04V_CM4_R [mm]
height 2.4
pads (100):
  rect 0.2x0.7 smd: 1(9.8,1.54) 2(9.8,-1.54) 3(9.4,1.54) 4(9.4,-1.54) 5(9,1.54) 6(9,-1.54) 7(8.6,1.54) 8(8.6,-1.54) 9(8.2,1.54) 10(8.2,-1.54) 11(7.8,1.54) 12(7.8,-1.54) 13(7.4,1.54) 14(7.4,-1.54) 15(7,1.54) 16(7,-1.54) 17(6.6,1.54) 18(6.6,-1.54) 19(6.2,1.54) 20(6.2,-1.54) 21(5.8,1.54) 22(5.8,-1.54) 23(5.4,1.54) 24(5.4,-1.54) 25(5,1.54) 26(5,-1.54) 27(4.6,1.54) 28(4.6,-1.54) 29(4.2,1.54) 30(4.2,-1.54) 31(3.8,1.54) 32(3.8,-1.54) 33(3.4,1.54) 34(3.4,-1.54) 35(3,1.54) 36(3,-1.54) 37(2.6,1.54) 38(2.6,-1.54) 39(2.2,1.54) 40(2.2,-1.54) 41(1.8,1.54) 42(1.8,-1.54) 43(1.4,1.54) 44(1.4,-1.54) 45(1,1.54) 46(1,-1.54) 47(0.6,1.54) 48(0.6,-1.54) 49(0.2,1.54) 50(0.2,-1.54) 51(-0.2,1.54) 52(-0.2,-1.54) 53(-0.6,1.54) 54(-0.6,-1.54) 55(-1,1.54) 56(-1,-1.54) 57(-1.4,1.54) 58(-1.4,-1.54) 59(-1.8,1.54) 60(-1.8,-1.54) 61(-2.2,1.54) 62(-2.2,-1.54) 63(-2.6,1.54) 64(-2.6,-1.54) 65(-3,1.54) 66(-3,-1.54) 67(-3.4,1.54) 68(-3.4,-1.54) 69(-3.8,1.54) 70(-3.8,-1.54) 71(-4.2,1.54) 72(-4.2,-1.54) 73(-4.6,1.54) 74(-4.6,-1.54) 75(-5,1.54) 76(-5,-1.54) 77(-5.4,1.54) 78(-5.4,-1.54) 79(-5.8,1.54) 80(-5.8,-1.54) 81(-6.2,1.54) 82(-6.2,-1.54) 83(-6.6,1.54) 84(-6.6,-1.54) 85(-7,1.54) 86(-7,-1.54) 87(-7.4,1.54) 88(-7.4,-1.54) 89(-7.8,1.54) 90(-7.8,-1.54) 91(-8.2,1.54) 92(-8.2,-1.54) 93(-8.6,1.54) 94(-8.6,-1.54) 95(-9,1.54) 96(-9,-1.54) 97(-9.4,1.54) 98(-9.4,-1.54) 99(-9.8,1.54) 100(-9.8,-1.54)
Top Overlay:
  circle w0.1: c-21.5,-0.5 r2.5
  circle w0.1: c26.5,-0.5 r2.5
  lines w0.1: -10.5,-1.47 -11.3,-1.47 -11.3,1.47 -10.5,1.47 ; 10.5,-1.47 11.3,-1.47 11.3,1.47 10.5,1.47
  text "1" at 12.461,1.359 h1.6
  text "99" at -11.539,0.967 h1.6
  text "100" at -11.539,-2.229 h1.6
  text "2" at 12.462,-1.739 h1.6
Keep-Out Layer:
  board cut-out: -20.1,-0.5 -20.1,-0.362 -20.154,-0.092 -20.259,0.163 -20.413,0.392 -20.608,0.587 -20.837,0.741 -21.092,0.846 -21.362,0.9 -21.5,0.9 -21.638,0.9 -21.908,0.846 -22.163,0.741 -22.392,0.587 -22.587,0.392 -22.741,0.163 -22.846,-0.092 -22.9,-0.362 -22.9,-0.5 -22.9,-0.638 -22.846,-0.908 -22.741,-1.163 -22.587,-1.392 -22.392,-1.587 -22.163,-1.741 -21.908,-1.846 -21.638,-1.9 -21.5,-1.9 -21.362,-1.9 -21.092,-1.846 -20.837,-1.741 -20.608,-1.587 -20.413,-1.392 -20.259,-1.163 -20.154,-0.908 -20.1,-0.638
  board cut-out: 27.9,-0.5 27.9,-0.362 27.846,-0.092 27.741,0.163 27.587,0.392 27.392,0.587 27.163,0.741 26.908,0.846 26.638,0.9 26.5,0.9 26.362,0.9 26.092,0.846 25.837,0.741 25.608,0.587 25.413,0.392 25.259,0.163 25.154,-0.092 25.1,-0.362 25.1,-0.5 25.1,-0.638 25.154,-0.908 25.259,-1.163 25.413,-1.392 25.608,-1.587 25.837,-1.741 26.092,-1.846 26.362,-1.9 26.5,-1.9 26.638,-1.9 26.908,-1.846 27.163,-1.741 27.392,-1.587 27.587,-1.392 27.741,-1.163 27.846,-0.908 27.9,-0.638
Top Assembly:
  lines w0.15: -25,-0.5 cw(c-21.5,-0.5) -21.5,3 ; -23.5,-0.5 -19.5,-0.5 ; -21.5,-2.5 -21.5,1.5 ; 0.55,-17 4.55,-17 ; 2.55,-19 2.55,-15 ; 24.5,-0.5 28.5,-0.5 ; 26.5,-2.5 26.5,1.5 ; 26.5,3 cw(c26.5,-0.5) 30,-0.5
  lines w0.18: -25,-20 -25,-0.5 ; -21.5,3 26.5,3 ; 30,-20 30,-0.5
  text "CM4_center" at -2.283,-14.376 h3
Top 3D Body:
  lines w0.2: -11.3,-1.47 -11.3,1.47 11.3,1.47 11.3,-1.47 -11.3,-1.47
Top Courtyard:
  lines w0.1: -12.3,-2.89 -12.3,2.89 12.3,2.89 12.3,-2.89 -12.3,-2.89
3D body "DF40HC_3.0_-100DS-0.4V_51.stp": height 2.91, standoff 0.01, extent -11.3,-1.69 11.3,1.69

## ESP32-ETH01 [mm]
pads (26):
  rect 1.6x1.6 hole 1.1: 1(-11.493,15.24)
  round 1.6 hole 1.1: 2(-11.493,12.7) 3(-11.493,10.16) 4(-11.493,7.62) 5(-11.493,5.08) 6(-11.493,2.54) 7(-11.493,0) 8(-11.493,-2.54) 9(-11.493,-5.08) 10(-11.493,-7.62) 11(-11.493,-10.16) 12(-11.493,-12.7) 13(-11.493,-15.24) 14(11.493,-15.24) 15(11.493,-12.7) 16(11.493,-10.16) 17(11.493,-7.62) 18(11.493,-5.08) 19(11.493,-2.54) 20(11.493,0)
  round 1.5 hole 1: 21(11.493,2.54) 22(11.493,5.08) 23(11.493,7.62) 24(11.493,10.16) 25(11.493,12.7) 26(11.493,15.24)
Top Overlay:
  lines w0.15: -12.8,-29.3 -12.8,24 12.8,24 12.8,-29.3 8,-29.3 8,-36.2 -8,-36.2 -8,-29.3 -12.8,-29.3
Top Assembly:
  lines w0.1: -13,-36.5 13,-36.5 13,24 -13,24 -13,-36.5
Mechanical 15:
  lines w0.1: -1,0 1,0 ; 0,-1 0,1
3D body "WT32-ESP01 v2.step": height 14.05, standoff -2.5, extent -12.759,-36.205 12.79,24.1

## ESP32-ETH01_REVERSE [mm]
pads (26):
  rect 1.6x1.6 hole 1.1: 1(11.493,15.24)
  round 1.6 hole 1.1: 2(11.493,12.7) 3(11.493,10.16) 4(11.493,7.62) 5(11.493,5.08) 6(11.493,2.54) 7(11.493,0) 8(11.493,-2.54) 9(11.493,-5.08) 10(11.493,-7.62) 11(11.493,-10.16) 12(11.493,-12.7) 13(11.493,-15.24) 14(-11.493,-15.24) 15(-11.493,-12.7) 16(-11.493,-10.16) 17(-11.493,-7.62) 18(-11.493,-5.08) 19(-11.493,-2.54) 20(-11.493,0)
  round 1.5 hole 1: 21(-11.493,2.54) 22(-11.493,5.08) 23(-11.493,7.62) 24(-11.493,10.16) 25(-11.493,12.7) 26(-11.493,15.24)
Top Overlay:
  lines w0.15: -12.8,-29.3 -12.8,24 12.8,24 12.8,-29.3 8,-29.3 8,-36.2 -8,-36.2 -8,-29.3 -12.8,-29.3
Top Assembly:
  lines w0.1: -13,-36.5 13,-36.5 13,24 -13,24 -13,-36.5
Mechanical 15:
  lines w0.1: -1,0 1,0 ; 0,-1 0,1
3D body "WT32-ESP01 v2.step": height 16.5, standoff -0.05, extent -12.9,-36.205 12.649,24.1
3D body "User Library-PBS_(DS1023)_1line_connectors_h=5_0_8_5mm_step_2_54mm-1.step": height 8.5, standoff -3, extent 10.243,-19.3 12.744,16.76
3D body "User Library-PBS_(DS1023)_1line_connectors_h=5_0_8_5mm_step_2_54mm-1.step": height 8.5, standoff -3, extent -12.744,-19.3 -10.243,16.76

## ESP32S3DevKitC1N8 [mm]
pads (44):
  rect 2.775x1.665 hole 1.11: A1(-11.43,-0.1) A2(-11.43,-2.64) A3(-11.43,-5.18) A4(-11.43,-7.72) A5(-11.43,-10.26) A6(-11.43,-12.8) A7(-11.43,-15.34) A8(-11.43,-17.88) A9(-11.43,-20.42) A10(-11.43,-22.96) A11(-11.43,-25.5) A12(-11.43,-28.04) A13(-11.43,-30.58) A14(-11.43,-33.12) A15(-11.43,-35.66) A16(-11.43,-38.2) A17(-11.43,-40.74) A18(-11.43,-43.28) A19(-11.43,-45.82) A20(-11.43,-48.36) A21(-11.43,-50.9) A22(-11.43,-53.44) B1(11.43,-0.1) B2(11.43,-2.64) B3(11.43,-5.18) B4(11.43,-7.72) B5(11.43,-10.26) B6(11.43,-12.8) B7(11.43,-15.34) B8(11.43,-17.88) B9(11.43,-20.42) B10(11.43,-22.96) B11(11.43,-25.5) B12(11.43,-28.04) B13(11.43,-30.58) B14(11.43,-33.12) B15(11.43,-35.66) B16(11.43,-38.2) B17(11.43,-40.74) B18(11.43,-43.28) B19(11.43,-45.82) B20(11.43,-48.36) B21(11.43,-50.9) B22(11.43,-53.44)
Top Overlay:
  lines w0.1: -13.638,-0.075 cw(c-13.588,-0.075) -13.538,-0.075 cw(c-13.588,-0.075) -13.638,-0.075
  lines w0.2: -12.7,-54.77 -12.7,-62 12.7,-62 12.7,-54.77 ; -12.7,2.3 12.7,2.3
Mechanical 13:
  lines w0.1: -12.7,-62.44 12.7,-62.44 12.7,2.3 -12.7,2.3 -12.7,-62.44
Mechanical 15:
  lines w0.1: -13,-62.44 13,-62.44 13,2.3 -13,2.3 -13,-62.44
3D body "ESP32-S3-DevKitC-1-N8R8.stp": height 7.39, standoff -6, extent -12.7,-62 12.7,7.64

## ESP32WROOM32E [mm]
pads (47):
  rect 2x0.9 smd: 1(-8.5,4.76) 2(-8.5,3.49) 3(-8.5,2.22) 4(-8.5,0.95) 5(-8.5,-0.32) 6(-8.5,-1.59) 7(-8.5,-2.86) 8(-8.5,-4.13) 9(-8.5,-5.4) 10(-8.5,-6.67) 11(-8.5,-7.94) 12(-8.5,-9.21) 13(-8.5,-10.48) 14(-8.5,-11.75) 25(8.5,-11.75) 26(8.5,-10.48) 27(8.5,-9.21) 28(8.5,-7.94) 29(8.5,-6.67) 30(8.5,-5.4) 31(8.5,-4.13) 32(8.5,-2.86) 33(8.5,-1.59) 34(8.5,-0.32) 35(8.5,0.95) 36(8.5,2.22) 37(8.5,3.49) 38(8.5,4.76)
  rect 0.9x2 smd: 15(-5.715,-12.75) 16(-4.445,-12.75) 17(-3.175,-12.75) 18(-1.905,-12.75) 19(-0.635,-12.75) 20(0.635,-12.75) 21(1.905,-12.75) 22(3.175,-12.75) 23(4.445,-12.75) 24(5.715,-12.75)
  rect 1.33x1.33 smd: 39(-1,-2.24) 40(-2.835,-4.075) 41(-1,-4.075) 42(0.835,-4.075) 43(0.835,-2.24) 44(0.835,-0.405) 45(-1,-0.405) 46(-2.835,-0.405) 47(-2.835,-2.24)
Top Overlay:
  lines w0.1: -10.1,4.8 cw(c-10.05,4.8) -10,4.8 cw(c-10.05,4.8) -10.1,4.8
  lines w0.2: -9,6.25 -9,12.75 9,12.75 9,6.25
Mechanical 13:
  lines w0.2: -9,-12.75 9,-12.75 9,12.75 -9,12.75 -9,-12.75
Mechanical 15:
  lines w0.1: -10.5,-14.75 10.5,-14.75 10.5,13.75 -10.5,13.75 -10.5,-14.75
3D body "ESP32-WROOM-32UE_M113EH2800UH3Q0_.stp": height 3.2, standoff 0, extent -9,-13.25 9,5.95

## ESP32WROOM32UE [mm]
pads (47):
  rect 2x0.9 smd: 1(-8.5,4.76) 2(-8.5,3.49) 3(-8.5,2.22) 4(-8.5,0.95) 5(-8.5,-0.32) 6(-8.5,-1.59) 7(-8.5,-2.86) 8(-8.5,-4.13) 9(-8.5,-5.4) 10(-8.5,-6.67) 11(-8.5,-7.94) 12(-8.5,-9.21) 13(-8.5,-10.48) 14(-8.5,-11.75) 25(8.5,-11.75) 26(8.5,-10.48) 27(8.5,-9.21) 28(8.5,-7.94) 29(8.5,-6.67) 30(8.5,-5.4) 31(8.5,-4.13) 32(8.5,-2.86) 33(8.5,-1.59) 34(8.5,-0.32) 35(8.5,0.95) 36(8.5,2.22) 37(8.5,3.49) 38(8.5,4.76)
  rect 0.9x2 smd: 15(-5.715,-12.75) 16(-4.445,-12.75) 17(-3.175,-12.75) 18(-1.905,-12.75) 19(-0.635,-12.75) 20(0.635,-12.75) 21(1.905,-12.75) 22(3.175,-12.75) 23(4.445,-12.75) 24(5.715,-12.75)
  rect 1.33x1.33 smd: 39(-1,-2.24) 40(-2.835,-4.075) 41(-1,-4.075) 42(0.835,-4.075) 43(0.835,-2.24) 44(0.835,-0.405) 45(-1,-0.405) 46(-2.835,-0.405) 47(-2.835,-2.24)
Top Overlay:
  circle w0.2: c-10.25,4.75 r0.1
  lines w0.2: -9,-13.25 -6.75,-13.25 ; -9,6.25 9,6.25 ; 6.75,-13.25 9,-13.25
Mechanical 13:
  lines w0.2: -9,-13.25 -9,6.25 9,6.25 9,-13.25 -9,-13.25
Mechanical 15:
  lines w0.1: -10.5,-14.75 -10.5,6.25 10.5,6.25 10.5,-14.75 -10.5,-14.75
3D body "ESP32-WROOM-32UE_M113EH2800UH3Q0_.stp": height 3.2, standoff 0, extent -9,-13.25 9,5.95

## FBUS22.5-05P-11-00A(H) [mil] "FMEH-04P-BUSCONN"
height 551.18
pads (10):
  round 1 smd: 1(1566.09,244.47) 2(1716.09,244.47) 3(1866.09,244.47) 4(2016.09,244.47) 5(2166.09,244.47)
  round 1 smd far side: 6(1566.09,244.47) 7(1716.09,244.47) 8(1866.09,244.47) 9(2016.09,244.47) 10(2166.09,244.47)
Top Layer:
  region: 2126.72,149.98 2126.72,338.96 2205.46,338.96 2205.46,149.98
  region: 1976.72,149.98 1976.72,338.96 2055.46,338.96 2055.46,149.98
  region: 1826.72,149.98 1905.46,149.98 1905.46,338.96 1826.72,338.96
  region: 1676.72,149.98 1755.46,149.98 1755.46,338.96 1676.72,338.96
  region: 1526.72,149.98 1526.72,338.96 1605.46,338.96 1605.46,149.98
Bottom Layer:
  region: 2126.72,149.98 2126.72,338.96 2205.46,338.96 2205.46,149.98
  region: 1976.72,149.98 1976.72,338.96 2055.46,338.96 2055.46,149.98
  region: 1826.72,149.98 1905.46,149.98 1905.46,338.96 1826.72,338.96
  region: 1676.72,149.98 1755.46,149.98 1755.46,338.96 1676.72,338.96
  region: 1526.72,149.98 1526.72,338.96 1605.46,338.96 1605.46,149.98
Top Assembly:
  drawing of 90 lines, arcs and shapes, not listed
  text "PCb Edge" at 1839.41,14.44 h157.48
  text "2.09" at 646.1,4035.25 h98.43
  text "73.2" at 1756.53,4232.1 h98.43
  text "2.28" at 112.26,3373.11 h98.43
  text "21.6" at -190.51,3233.53 h98.43
  text "21.6" at -190.51,2382.88 h98.43
  text "98" at -431.53,1866.48 h98.43
  text "94.8" at 1756.53,-689.16 h98.43
  text "2" at 1807,-64.56 h98.43
  text "5-" at 1696.49,-64.56 h98.43
  text "4.8" at 1277.67,-285.26 h98.43
  text "5-" at 1277.67,-395.76 h98.43
  text "O" at 1319.99,3992.38 h98.43
  text "1.7" at 1448.33,4022.93 h98.43
  text "24-" at 1151.56,3952.28 h98.43
  text "3.81" at -157.54,267.2 h98.43
  text "3.81" at 2401.79,-372.48 h98.43
  text "4-" at 2291.28,-372.48 h98.43
  text "39.78" at 2808.26,-189.93 h98.43
  text "2.09" at 3402.01,4035.25 h98.43
  text "2.28" at 3688.34,3466.18 h98.43
  text "21.6" at 3506.1,3233.53 h98.43
  text "21.6" at 3506.1,2382.88 h98.43
  text "5" at 3856.28,2060.46 h98.43
  text "18-" at 3761.98,1915.26 h98.43
Bottom Assembly:
  lines w0.5: 409.14,2067.29 605.99,2067.29 ; 409.14,2917.68 605.99,2917.68 ; 409.13,3768.6 605.98,3768.6 ; 507.56,1968.87 507.56,2165.72 ; 507.56,2819.26 507.56,3016.11 ; 507.56,3670.17 507.56,3867.02 ; 516.35,1902.2 713.2,1902.2 ; 516.35,2752.59 713.2,2752.59 ; 516.34,3603.51 713.19,3603.51 ; 614.77,3505.08 614.77,3701.93 ; 614.77,1803.77 614.77,2000.62 ; 614.77,2654.17 614.77,2851.02 ; 623.56,1737.11 820.41,1737.11 ; 623.56,2587.5 820.41,2587.5 ; 623.56,3438.41 820.41,3438.41 ; 721.99,1638.68 721.99,1835.53 ; 721.99,2489.07 721.99,2685.92 ; 721.98,3339.99 721.98,3536.84 ; 730.77,1572.01 927.62,1572.01 ; 730.77,2422.41 927.62,2422.41 ; 730.77,3273.32 927.62,3273.32 ; 829.2,1473.59 829.2,1670.44 ; 829.2,2323.98 829.2,2520.83 ; 829.19,3174.9 829.19,3371.75 ; 1566.09,90.93 1566.09,398.01 ; 1716.09,90.93 1716.09,398.01 ; 1866.09,90.93 1866.09,398.01 ; 2016.09,90.93 2016.09,398.01 ; 2166.09,90.93 2166.09,398.01 ; 2804.66,1572.01 3001.51,1572.01 ; 2804.66,2422.41 3001.51,2422.41 ; 2804.66,3273.32 3001.51,3273.32 ; 2903.08,1473.59 2903.08,1670.44 ; 2903.08,2323.98 2903.08,2520.83 ; 2903.09,3174.9 2903.09,3371.75 ; 2911.87,1737.11 3108.72,1737.11 ; 2911.87,2587.5 3108.72,2587.5 ; 2911.88,3438.41 3108.73,3438.41 ; 3010.3,1638.68 3010.3,1835.53 ; 3010.3,2489.07 3010.3,2685.92 ; 3010.3,3339.99 3010.3,3536.84 ; 3019.08,1902.2 3215.93,1902.2 ; 3019.08,2752.59 3215.93,2752.59 ; 3019.09,3603.51 3215.94,3603.51 ; 3117.51,1803.77 3117.51,2000.62 ; 3117.51,2654.17 3117.51,2851.02 ; 3117.51,3505.08 3117.51,3701.93 ; 3126.3,2067.29 3323.15,2067.29 ; 3126.3,2917.68 3323.15,2917.68 ; 3126.3,3768.6 3323.15,3768.6 ; 3224.72,1968.87 3224.72,2165.72 ; 3224.72,2819.26 3224.72,3016.11 ; 3224.73,3670.17 3224.73,3867.02
Top Courtyard:
  circle w0.5: c721.98,3438.41 r33.46
  circle w0.5: c614.77,2752.59 r33.46
  circle w0.5: c721.99,2587.5 r33.46
  circle w0.5: c614.77,1902.2 r33.46
  circle w0.5: c721.99,1737.11 r33.46
  circle w0.5: c3117.51,3603.51 r33.46
  circle w0.5: c3224.72,2917.68 r33.46
  circle w0.5: c3117.51,2752.59 r33.46
  circle w0.5: c3224.72,2067.29 r33.46
  circle w0.5: c3117.51,1902.2 r33.46
  circle w0.5: c614.77,3603.51 r33.46
  circle w0.5: c3224.73,3768.6 r33.46
  circle w0.5: c3010.3,3438.41 r33.46
  circle w0.5: c2903.09,3273.32 r33.46
  circle w0.5: c3010.3,2587.5 r33.46
  circle w0.5: c2903.08,2422.41 r33.46
  circle w0.5: c829.2,1572.01 r33.46
  circle w0.5: c507.56,2067.29 r33.46
  circle w0.5: c507.56,3768.6 r33.46
  circle w0.5: c829.19,3273.32 r33.46
  circle w0.5: c829.2,2422.41 r33.46
  circle w0.5: c507.56,2917.68 r33.46
  circle w0.5: c2903.08,1572.01 r33.46
  circle w0.5: c3010.3,1737.11 r33.46
  lines w0.5: 1526.72,149.98 1441.21,149.98 1386.61,-0.02 163.92,-0.02 108.1,34.98 0,258.39 0,872.03 47.24,872.03 ccw(c47.24,950.77) 125.98,950.77 125.98,1049.97 425.2,1244.28 425.2,1577.23 631.04,1710.9 425.2,2027.86 425.2,2427.62 631.04,2561.29 425.2,2878.26 425.2,3278.54 631.03,3412.21 425.2,3729.16 425.2,3858.25 3307.09,3858.25 3307.09,3729.16 3101.25,3412.21 3307.09,3278.54 3307.09,2878.26 3101.25,2561.29 3307.09,2427.62 3307.09,2027.86 3101.25,1710.9 3307.09,1577.23 3307.09,1244.28 3606.3,1049.97 3606.3,950.77 ccw(c3685.04,950.77) 3685.04,872.03 3732.28,872.03 3732.28,152.33 3716.54,152.33 ccw(c3716.54,26.35) 3590.55,26.35 3590.55,-3.95 2439.52,-3.95 2383.49,149.98 2205.46,149.98 ; 1526.72,149.98 1605.46,149.98 ; 1526.72,149.98 1526.72,338.96 1605.46,338.96 1605.46,149.98 ; 1605.46,149.98 1676.72,149.98 ; 1676.72,149.98 1676.72,338.96 1755.46,338.96 1755.46,149.98 ; 1676.72,149.98 1755.46,149.98 ; 1755.46,149.98 1826.72,149.98 ; 1826.72,149.98 1826.72,338.96 1905.46,338.96 1905.46,149.98 ; 1826.72,149.98 1905.46,149.98 ; 1905.46,149.98 1976.72,149.98 ; 1976.72,149.98 2055.46,149.98 ; 1976.72,149.98 1976.72,338.96 2055.46,338.96 2055.46,149.98 ; 2055.46,149.98 2126.72,149.98 ; 2126.72,149.98 2126.72,338.96 2205.46,338.96 2205.46,149.98 ; 2126.72,149.98 2205.46,149.98
  lines w7.87: 1468.5,149.61 1468.5,570.87 2271.65,570.87 2271.65,149.61

## FETMX6Q-C [mm]
pads (324):
  round 3.5 hole 2: 0(-18,-33) 0(-18,33) 0(18,-33) 0(18,33)
  rect 1.3x0.25 smd: 1(-14.346,5.736) 1(-13.351,-25.254) 1(18.738,-25.245) 1(19.75,5.763) 2(-19.746,5.736) 2(-18.751,-25.254) 2(13.338,-25.245) 2(14.35,5.763) 3(-14.346,6.236) 3(-13.351,-24.754) 3(18.738,-24.745) 3(19.75,6.263) 4(-19.746,6.236) 4(-18.751,-24.754) 4(13.338,-24.745) 4(14.35,6.263) 5(-14.346,6.736) 5(-13.351,-24.254) 5(18.738,-24.245) 5(19.75,6.763) 6(-19.746,6.736) 6(-18.751,-24.254) 6(13.338,-24.245) 6(14.35,6.763) 7(-14.346,7.236) 7(-13.351,-23.754) 7(18.738,-23.745) 7(19.75,7.263) 8(-19.746,7.236) 8(-18.751,-23.754) 8(13.338,-23.745) 8(14.35,7.263) 9(-14.346,7.736) 9(-13.351,-23.254) 9(18.738,-23.245) 9(19.75,7.763) 10(-19.746,7.736) 10(-18.751,-23.254) 10(13.338,-23.245) 10(14.35,7.763) 11(-14.346,8.236) 11(-13.351,-22.754) 11(18.738,-22.745) 11(19.75,8.263) 12(-19.746,8.236) 12(-18.751,-22.754) 12(13.338,-22.745) 12(14.35,8.263) 13(-14.346,8.736) 13(-13.351,-22.254) 13(18.738,-22.245) 13(19.75,8.763) 14(-19.746,8.736) 14(-18.751,-22.254) 14(13.338,-22.245) 14(14.35,8.763) 15(-14.346,9.236) 15(-13.351,-21.754) 15(18.738,-21.745) 15(19.75,9.263) 16(-19.746,9.236) 16(-18.751,-21.754) 16(13.338,-21.745) 16(14.35,9.263) 17(-14.346,9.736) 17(-13.351,-21.254) 17(18.738,-21.245) 17(19.75,9.763) 18(-19.746,9.736) 18(-18.751,-21.254) 18(13.338,-21.245) 18(14.35,9.763) 19(-14.346,10.236) 19(-13.351,-20.754) 19(18.738,-20.745) 19(19.75,10.263) 20(-19.746,10.236) 20(-18.751,-20.754) 20(13.338,-20.745) 20(14.35,10.263) 21(-14.346,10.736) 21(-13.351,-20.254) 21(18.738,-20.245) 21(19.75,10.763) 22(-19.746,10.736) 22(-18.751,-20.254) 22(13.338,-20.245) 22(14.35,10.763) 23(-14.346,11.236) 23(-13.351,-19.754) 23(18.738,-19.745) 23(19.75,11.263) 24(-19.746,11.236) 24(-18.751,-19.754) 24(13.338,-19.745) 24(14.35,11.263) 25(-14.346,11.736) 25(-13.351,-19.254) 25(18.738,-19.245) 25(19.75,11.763) 26(-19.746,11.736) 26(-18.751,-19.254) 26(13.338,-19.245) 26(14.35,11.763) 27(-14.346,12.236) 27(-13.351,-18.754) 27(18.738,-18.745) 27(19.75,12.263) 28(-19.746,12.236) 28(-18.751,-18.754) 28(13.338,-18.745) 28(14.35,12.263) 29(-14.346,12.736) 29(-13.351,-18.254) 29(18.738,-18.245) 29(19.75,12.763) 30(-19.746,12.736) 30(-18.751,-18.254) 30(13.338,-18.245) 30(14.35,12.763) 31(-14.346,13.236) 31(-13.351,-17.754) 31(18.738,-17.745) 31(19.75,13.263) 32(-19.746,13.236) 32(-18.751,-17.754) 32(13.338,-17.745) 32(14.35,13.263) 33(-14.346,13.736) 33(-13.351,-17.254) 33(18.738,-17.245) 33(19.75,13.763) 34(-19.746,13.736) 34(-18.751,-17.254) 34(13.338,-17.245) 34(14.35,13.763) 35(-14.346,14.236) 35(-13.351,-16.754) 35(18.738,-16.745) 35(19.75,14.263) 36(-19.746,14.236) 36(-18.751,-16.754) 36(13.338,-16.745) 36(14.35,14.263) 37(-14.346,14.736) 37(-13.351,-16.254) 37(18.738,-16.245) 37(19.75,14.763) 38(-19.746,14.736) 38(-18.751,-16.254) 38(13.338,-16.245) 38(14.35,14.763) 39(-14.346,15.236) 39(-13.351,-15.754) 39(18.738,-15.745) 39(19.75,15.263) 40(-19.746,15.236) 40(-18.751,-15.754) 40(13.338,-15.745) 40(14.35,15.263) 41(-14.346,15.736) 41(-13.351,-15.254) 41(18.738,-15.245) 41(19.75,15.763) 42(-19.746,15.736) 42(-18.751,-15.254) 42(13.338,-15.245) 42(14.35,15.763) 43(-14.346,16.236) 43(-13.351,-14.754) 43(18.738,-14.745) 43(19.75,16.263) 44(-19.746,16.236) 44(-18.751,-14.754) 44(13.338,-14.745) 44(14.35,16.263) 45(-14.346,16.736) 45(-13.351,-14.254) 45(18.738,-14.245) 45(19.75,16.763) 46(-19.746,16.736) 46(-18.751,-14.254) 46(13.338,-14.245) 46(14.35,16.763) 47(-14.346,17.236) 47(-13.351,-13.754) 47(18.738,-13.745) 47(19.75,17.263) 48(-19.746,17.236) 48(-18.751,-13.754) 48(13.338,-13.745) 48(14.35,17.263) 49(-14.346,17.736) 49(-13.351,-13.254) 49(18.738,-13.245) 49(19.75,17.763) 50(-19.746,17.736) 50(-18.751,-13.254) 50(13.338,-13.245) 50(14.35,17.763) 51(-14.346,18.236) 51(-13.351,-12.754) 51(18.738,-12.745) 51(19.75,18.263) 52(-19.746,18.236) 52(-18.751,-12.754) 52(13.338,-12.745) 52(14.35,18.263) 53(-14.346,18.736) 53(-13.351,-12.254) 53(18.738,-12.245) 53(19.75,18.763) 54(-19.746,18.736) 54(-18.751,-12.254) 54(13.338,-12.245) 54(14.35,18.763) 55(-14.346,19.236) 55(-13.351,-11.754) 55(18.738,-11.745) 55(19.75,19.263) 56(-19.746,19.236) 56(-18.751,-11.754) 56(13.338,-11.745) 56(14.35,19.263) 57(-14.346,19.736) 57(-13.351,-11.254) 57(18.738,-11.245) 57(19.75,19.763) 58(-19.746,19.736) 58(-18.751,-11.254) 58(13.338,-11.245) 58(14.35,19.763) 59(-14.346,20.236) 59(-13.351,-10.754) 59(18.738,-10.745) 59(19.75,20.263) 60(-19.746,20.236) 60(-18.751,-10.754) 60(13.338,-10.745) 60(14.35,20.263) 61(-14.346,20.736) 61(-13.351,-10.254) 61(18.738,-10.245) 61(19.75,20.763) 62(-19.746,20.736) 62(-18.751,-10.254) 62(13.338,-10.245) 62(14.35,20.763) 63(-14.346,21.236) 63(-13.351,-9.754) 63(18.738,-9.745) 63(19.75,21.263) 64(-19.746,21.236) 64(-18.751,-9.754) 64(13.338,-9.745) 64(14.35,21.263) 65(-14.346,21.736) 65(-13.351,-9.254) 65(18.738,-9.245) 65(19.75,21.763) 66(-19.746,21.736) 66(-18.751,-9.254) 66(13.338,-9.245) 66(14.35,21.763) 67(-14.346,22.236) 67(-13.351,-8.754) 67(18.738,-8.745) 67(19.75,22.263) 68(-19.746,22.236) 68(-18.751,-8.754) 68(13.338,-8.745) 68(14.35,22.263) 69(-14.346,22.736) 69(-13.351,-8.254) 69(18.738,-8.245) 69(19.75,22.763) 70(-19.746,22.736) 70(-18.751,-8.254) 70(13.338,-8.245) 70(14.35,22.763) 71(-14.346,23.236) 71(-13.351,-7.754) 71(18.738,-7.745) 71(19.75,23.263) 72(-19.746,23.236) 72(-18.751,-7.754) 72(13.338,-7.745) 72(14.35,23.263) 73(-14.346,23.736) 73(-13.351,-7.254) 73(18.738,-7.245) 73(19.75,23.763) 74(-19.746,23.736) 74(-18.751,-7.254) 74(13.338,-7.245) 74(14.35,23.763) 75(-14.346,24.236) 75(-13.351,-6.754) 75(18.738,-6.745) 75(19.75,24.263) 76(-19.746,24.236) 76(-18.751,-6.754) 76(13.338,-6.745) 76(14.35,24.263) 77(-14.346,24.736) 77(-13.351,-6.254) 77(18.738,-6.245) 77(19.75,24.763) 78(-19.746,24.736) 78(-18.751,-6.254) 78(13.338,-6.245) 78(14.35,24.763) 79(-14.346,25.236) 79(-13.351,-5.754) 79(18.738,-5.745) 79(19.75,25.263) 80(-19.746,25.236) 80(-18.751,-5.754) 80(13.338,-5.745) 80(14.35,25.263)
via -15.446,4.386 diameter 0.8 hole 0.8
via -18.646,26.586 diameter 0.8 hole 0.8
via -14.451,-26.604 diameter 0.8 hole 0.8
via -17.651,-4.404 diameter 0.8 hole 0.8
via 14.438,-4.395 diameter 0.8 hole 0.8
via 17.638,-26.595 diameter 0.8 hole 0.8
via 15.45,26.613 diameter 0.8 hole 0.8
via 18.65,4.413 diameter 0.8 hole 0.8
Top Overlay:
  region: -12.656,5.336 -12.656,6.136 -13.396,5.736
  region: -11.661,-25.654 -11.661,-24.854 -12.401,-25.254
  region: 20.428,-25.645 20.428,-24.845 19.688,-25.245
  region: 21.44,5.363 21.44,6.163 20.7,5.763
  lines w0.2: -20,-32.987 -20,28.561 -20,32.984 cw(c-17.992,32.983) -17.99,34.991 17.993,34.991 cw(c17.992,32.983) 20,32.981 20,-32.985 cw(c17.985,-32.985) 17.983,-35 ; -19.999,-32.989 ccw(c-17.991,-32.991) -17.992,-34.999 ; -19.459,25.536 -19.459,26.986 ; -19.459,27.198 -19.459,26.986 ; -19.446,3.77 -19.446,3.986 ; -19.446,5.436 -19.446,3.986 ; -18.464,-5.454 -18.464,-4.004 ; -18.464,-3.792 -18.464,-4.004 ; -18.451,-27.22 -18.451,-27.004 ; -18.451,-25.554 -18.451,-27.004 ; -17.992,-35 17.985,-35 ; -14.659,25.536 -14.659,26.986 ; -14.659,27.202 -14.659,26.986 ; -14.646,3.774 -14.646,3.986 ; -14.646,5.436 -14.646,3.986 ; -13.664,-5.454 -13.664,-4.004 ; -13.664,-3.788 -13.664,-4.004 ; -13.651,-27.216 -13.651,-27.004 ; -13.651,-25.554 -13.651,-27.004 ; 13.625,-5.445 13.625,-3.995 ; 13.625,-3.783 13.625,-3.995 ; 13.638,-27.211 13.638,-26.995 ; 13.638,-25.545 13.638,-26.995 ; 14.637,25.563 14.637,27.013 ; 14.637,27.225 14.637,27.013 ; 14.65,3.797 14.65,4.013 ; 14.65,5.463 14.65,4.013 ; 18.425,-5.445 18.425,-3.995 ; 18.425,-3.779 18.425,-3.995 ; 18.438,-27.207 18.438,-26.995 ; 18.438,-25.545 18.438,-26.995 ; 19.437,25.563 19.437,27.013 ; 19.437,27.229 19.437,27.013 ; 19.45,3.801 19.45,4.013 ; 19.45,5.463 19.45,4.013 ; -19.459,26.986 -14.659,26.986 ; -19.446,3.986 -14.646,3.986 ; -18.464,-4.004 -13.664,-4.004 ; -18.451,-27.004 -13.651,-27.004 ; 13.625,-3.995 18.425,-3.995 ; 13.638,-26.995 18.438,-26.995 ; 14.637,27.013 19.437,27.013 ; 14.65,4.013 19.45,4.013
  lines w0.3: -21.459,10.236 -20.653,10.236 ; -21.456,15.236 -20.65,15.236 ; -21.446,20.236 -20.64,20.236 ; -20.917,7.73 -20.633,7.73 ; -20.916,22.726 -20.634,22.726 ; -20.906,17.729 -20.634,17.729 ; -20.898,12.728 -20.635,12.728 ; -20.464,-20.754 -19.658,-20.754 ; -20.461,-15.754 -19.655,-15.754 ; -20.451,-10.754 -19.645,-10.754 ; -19.922,-23.26 -19.638,-23.26 ; -19.921,-8.264 -19.639,-8.264 ; -19.911,-13.261 -19.639,-13.261 ; -19.903,-18.262 -19.64,-18.262 ; -13.456,7.736 -13.167,7.736 ; -13.45,12.739 -13.166,12.74 ; -13.45,17.731 -13.17,17.731 ; -13.451,22.735 -13.186,22.735 ; -13.446,10.246 -12.64,10.246 ; -13.446,20.246 -12.64,20.246 ; -13.436,15.226 -12.63,15.226 ; -12.461,-23.254 -12.172,-23.254 ; -12.456,-8.255 -12.191,-8.255 ; -12.455,-18.251 -12.171,-18.25 ; -12.455,-13.259 -12.175,-13.259 ; -12.451,-20.744 -11.645,-20.744 ; -12.451,-10.744 -11.645,-10.744 ; -12.441,-15.764 -11.635,-15.764 ; 11.625,-20.745 12.431,-20.745 ; 11.628,-15.745 12.434,-15.745 ; 11.638,-10.745 12.444,-10.745 ; 12.167,-23.251 12.451,-23.251 ; 12.168,-8.255 12.45,-8.255 ; 12.178,-13.252 12.45,-13.252 ; 12.186,-18.253 12.449,-18.253 ; 12.637,10.263 13.443,10.263 ; 12.64,15.263 13.446,15.263 ; 12.65,20.263 13.456,20.263 ; 13.179,7.757 13.463,7.757 ; 13.18,22.753 13.462,22.753 ; 13.19,17.756 13.462,17.756 ; 13.198,12.755 13.461,12.755 ; 19.628,-23.245 19.917,-23.245 ; 19.633,-8.246 19.898,-8.246 ; 19.634,-18.242 19.918,-18.241 ; 19.634,-13.25 19.914,-13.25 ; 19.638,-20.735 20.444,-20.735 ; 19.638,-10.735 20.444,-10.735 ; 19.648,-15.755 20.454,-15.755 ; 20.64,7.763 20.929,7.763 ; 20.645,22.762 20.91,22.762 ; 20.646,12.766 20.93,12.767 ; 20.646,17.758 20.926,17.758 ; 20.65,10.273 21.456,10.273 ; 20.65,20.273 21.456,20.273 ; 20.66,15.253 21.466,15.253